# Altium footprint library Components - 02.07.26 - 15.13.PcbLib: 1 footprints
Each footprint in its own frame and in the unit in brackets; x right, y up, seen from the top. Pads: shape width x height; smd on the part's side, far side on the other; paste and mask are expansions set on the pad; w line width, h text height; cw(c..) or ccw(c..) is an arc to the next point about the centre after c.
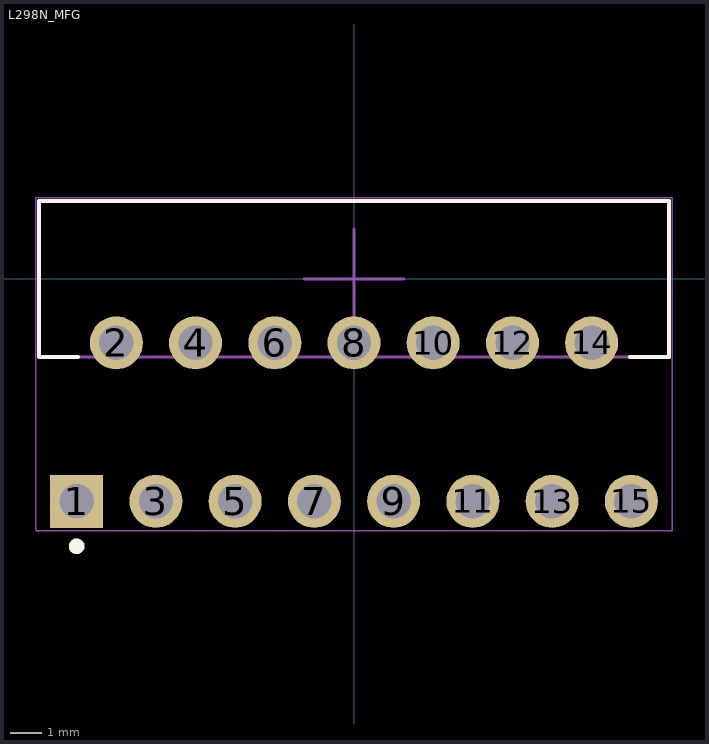
[diagram p0: the footprint, top view; thin cyan lines are the x and y axes]

## L298N_MFG [mm] "Recommended Land Pattern"
height 21
pads (15):
  rect 1.7x1.7 hole 1.1 paste-2539.97 mask+0: 1(-8.89,-7.13)
  round 1.7 hole 1.1 paste-2539.97 mask+0: 2(-7.62,-2.05) 3(-6.35,-7.13) 4(-5.08,-2.05) 5(-3.81,-7.13) 6(-2.54,-2.05) 7(-1.27,-7.13) 8(0,-2.05) 9(1.27,-7.13) 10(2.54,-2.05) 11(3.81,-7.13) 12(5.08,-2.05) 13(6.35,-7.13) 14(7.62,-2.05) 15(8.89,-7.13)
Top Overlay:
  circle w0.25: c-8.89,-8.575 r0.125
  lines w0.127: -8.845,-2.5 -10.1,-2.5 -10.1,2.5 10.1,2.5 10.1,-2.5 8.845,-2.5
Top Assembly:
  lines w0.1: -10.1,-2.5 -10.1,2.5 10.1,2.5 10.1,-2.5 -10.1,-2.5
Top Designator:
  text ".Designator" at 0,-2.552 h1
Top Courtyard:
  lines w0.05: -10.2,-8.08 -10.2,2.6 10.2,2.6 10.2,-8.08 -10.2,-8.08
Top Component Center (Mech17):
  lines w0.1: -1.602,0 1.602,0 ; 0,-1.602 0,1.602
3D body "L298N.STEP": height 21, standoff -4.4, extent -10.1,-7.39 10.1,2.5